# Altium schematic symbol library CY7C65213-32LTXI.SchLib: 1 symbol
Pins are listed as number, name and electrical type; pins without a type are passive.

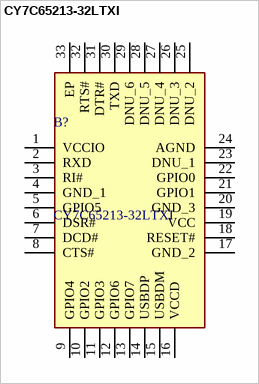
[diagram p0: symbol CY7C65213-32LTXI]

## CY7C65213-32LTXI
designator B?
USB Interface IC USB-UART LP Bridge Controller; Manufacturer_Name: Infineon; Geometry.Height: 1mm; Mouser Part Number: 727-CY7C65213-32LTXI; Mouser Price/Stock: https://www.mouser.co.uk/ProductDetail/Cypress-Semiconductor/CY7C65213-32LTXI?qs=zaNmQhktveH29yVGSodaDg%3D%3D; Manufacturer_Part_Number: CY7C65213-32LTXI; Datasheet Link: https://www.cypress.com/file/139881/download
footprint QFN50P500X500X100-33N-D
pins: 1 VCCIO, 2 RXD, 3 RI#, 4 GND_1, 5 GPIO5, 6 DSR#, 7 DCD#, 8 CTS#, 9 GPIO4, 10 GPIO2, 11 GPIO3, 12 GPIO6, 13 GPIO7, 14 USBDP, 15 USBDM, 16 VCCD, 17 GND_2, 18 RESET#, 19 VCC, 20 GND_3, 21 GPIO1, 22 GPIO0, 23 DNU_1, 24 AGND, 25 DNU_2, 26 DNU_3, 27 DNU_4, 28 DNU_5, 29 DNU_6, 30 TXD, 31 DTR#, 32 RTS#, 33 EP